# Altium footprint library 固定柱.PcbLib: 140 footprints (part 9 of 9)
Each footprint in its own frame and in the unit in brackets; x right, y up, seen from the top. Pads: shape width x height; smd on the part's side, far side on the other; paste and mask are expansions set on the pad; w line width, h text height; cw(c..) or ccw(c..) is an arc to the next point about the centre after c.
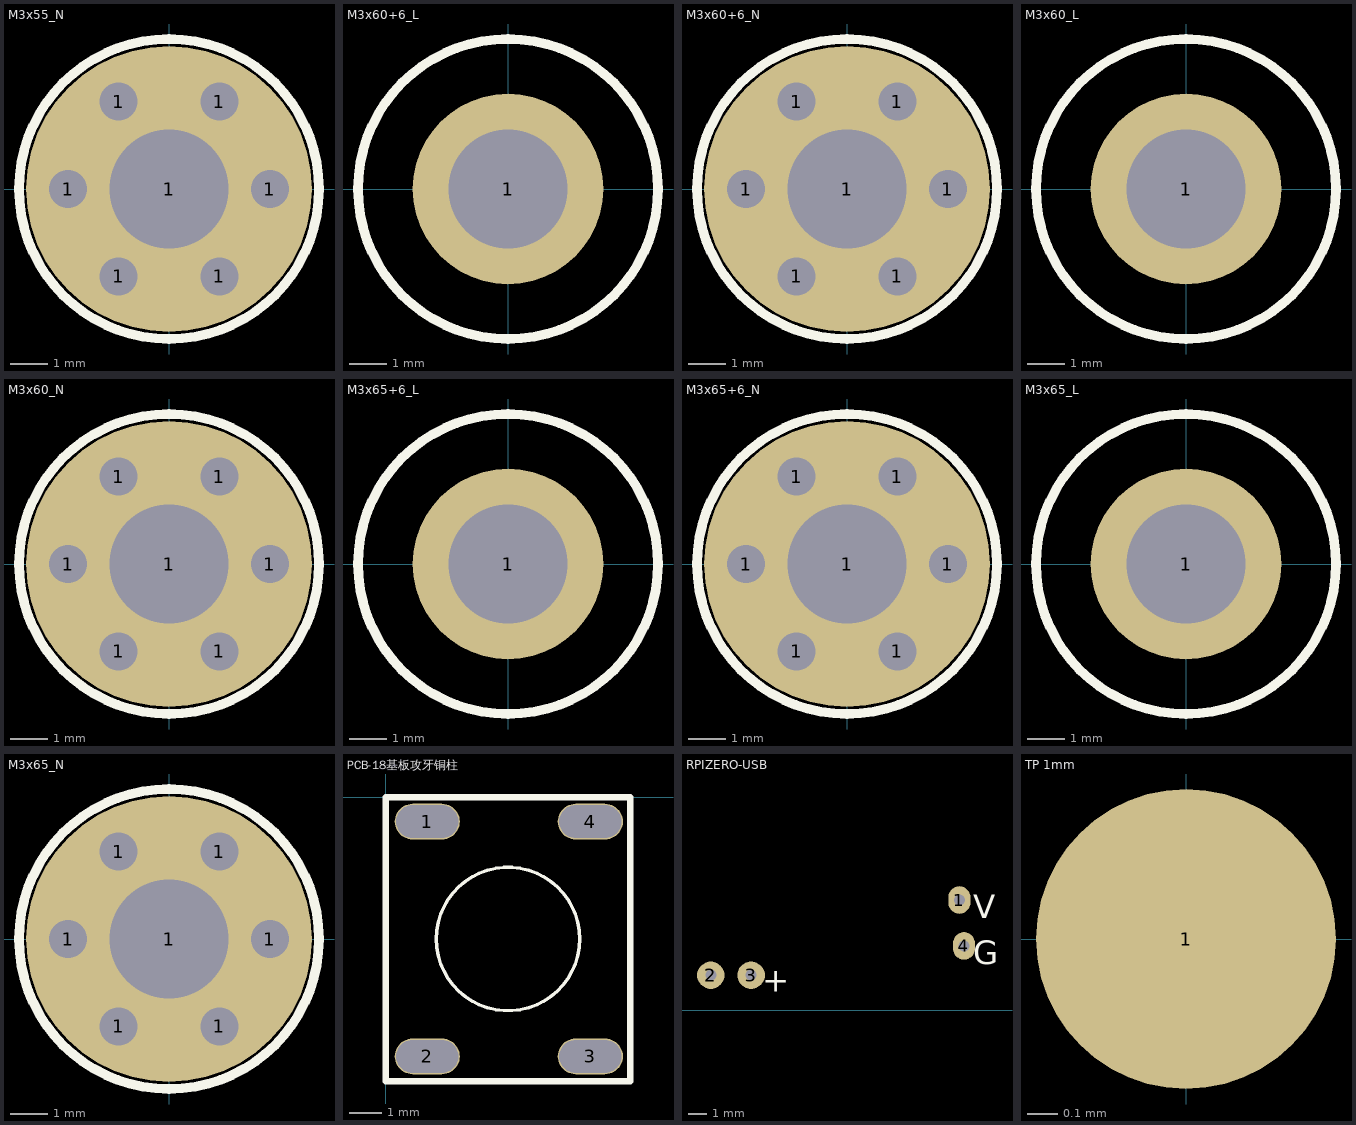
[diagram p8: the footprints below, top view; thin cyan lines are the x and y axes]

## M3x55_N [mil] "M3铜柱，长：55mm"
pads (7):
  round 40 hole 40: 1(-106,0) 1(-53,-91.8) 1(-53,91.8) 1(53,-91.8) 1(53,91.8) 1(106,0)
  round 300 hole 125: 1(0,0)
Top Overlay:
  circle w10: c0,0 r157.48
3D body "M3x55.STEP": height 2167.33, standoff 1.96, extent -106.22,-92.52 106.22,92.52

## M3x60+6_L [mil] "M3铜柱，长：60mm，螺纹长：6mm"
pads (1):
  round 200 hole 125: 1(0,0)
Top Overlay:
  circle w10: c0,0 r157.48
3D body "M3x60+6.STEP": height 2364.18, standoff -234.25, extent -106.22,-92.52 106.22,92.52

## M3x60+6_N [mil] "M3铜柱，长：60mm，螺纹长：6mm"
pads (7):
  round 40 hole 40: 1(-106,0) 1(-53,-91.8) 1(-53,91.8) 1(53,-91.8) 1(53,91.8) 1(106,0)
  round 300 hole 125: 1(0,0)
Top Overlay:
  circle w10: c0,0 r157.48
3D body "M3x60+6.STEP": height 2364.18, standoff -234.25, extent -106.22,-92.52 106.22,92.52

## M3x60_L [mil] "M3铜柱，长：60mm"
pads (1):
  round 200 hole 125: 1(0,0)
Top Overlay:
  circle w10: c0,0 r157.48
3D body "M3x60.STEP": height 2364.18, standoff 1.96, extent -106.22,-92.52 106.22,92.52

## M3x60_N [mil] "M3铜柱，长：60mm"
pads (7):
  round 40 hole 40: 1(-106,0) 1(-53,-91.8) 1(-53,91.8) 1(53,-91.8) 1(53,91.8) 1(106,0)
  round 300 hole 125: 1(0,0)
Top Overlay:
  circle w10: c0,0 r157.48
3D body "M3x60.STEP": height 2364.18, standoff 1.96, extent -106.22,-92.52 106.22,92.52

## M3x65+6_L [mil] "M3铜柱，长：65mm，螺纹长：6mm"
pads (1):
  round 200 hole 125: 1(0,0)
Top Overlay:
  circle w10: c0,0 r157.48
3D body "M3x65+6.STEP": height 2561.03, standoff -234.25, extent -106.22,-92.52 106.22,92.52

## M3x65+6_N [mil] "M3铜柱，长：65mm，螺纹长：6mm"
pads (7):
  round 40 hole 40: 1(-106,0) 1(-53,-91.8) 1(-53,91.8) 1(53,-91.8) 1(53,91.8) 1(106,0)
  round 300 hole 125: 1(0,0)
Top Overlay:
  circle w10: c0,0 r157.48
3D body "M3x65+6.STEP": height 2561.03, standoff -234.25, extent -106.22,-92.52 106.22,92.52

## M3x65_L [mil] "M3铜柱，长：65mm"
pads (1):
  round 200 hole 125: 1(0,0)
Top Overlay:
  circle w10: c0,0 r157.48
3D body "M3x65.STEP": height 2561.03, standoff 1.96, extent -106.22,-92.52 106.22,92.52

## M3x65_N [mil] "M3铜柱，长：65mm"
pads (7):
  round 40 hole 40: 1(-106,0) 1(-53,-91.8) 1(-53,91.8) 1(53,-91.8) 1(53,91.8) 1(106,0)
  round 300 hole 125: 1(0,0)
Top Overlay:
  circle w10: c0,0 r157.48
3D body "M3x65.STEP": height 2561.03, standoff 1.96, extent -106.22,-92.52 106.22,92.52

## PCB-18基板攻牙铜柱 [mm]
pads (4):
  oval 2x1.1 hole 1 slot 1.9 at 0 deg: 1(1.27,-0.75) 2(1.27,-7.95) 3(6.27,-7.95) 4(6.27,-0.75)
Top Overlay:
  circle w0.1: c3.746,-4.35 r2.2
  lines w0.2: 0,-8.712 7.492,-8.712 7.492,0 0,0 0,-8.712

## RPIZERO-USB [mm]
pads (4):
  oval 1.2x1.5 hole 0.6: 1(-11.25,6) 4(-11,3.5)
  round 1.5 hole 0.6: 2(-24.8,1.9) 3(-22.6,1.9)
Top Overlay:
  text "V" at -10.5,5 h1.3
  text "G" at -10.5,2.5 h1.3
  text "+" at -22,1 h1.3

## TP 1mm [mm] "1mm"
pads (1):
  round 1 smd: 1(0,0)